# Altium schematic symbol library 2021-01-25_09-15-21.SchLib: 2 symbols
Pins are listed as number, name and electrical type; pins without a type are passive.

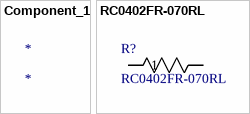
[diagram p0: symbols Component_1 to RC0402FR-070RL]

## Component_1
designator *

## RC0402FR-070RL
designator R?
No Description Available; Vendor: Yageo; Built_By: EMA_UL_Team; SourceLibrary: Yageo_2014-12-31; Manufacturer_Part_Number: RC0402FR-070RL; Copyright: Copyright (C) 2018 Accelerated Designs. All rights reserved; RefDes: RefDes; Type: DEV
footprint YAG_R0402_YAG
pins: 1, 2